# Altium integrated library UG-2864HSWEG01.IntLib: 1 symbol
Pins are listed as number, name and electrical type; pins without a type are passive.

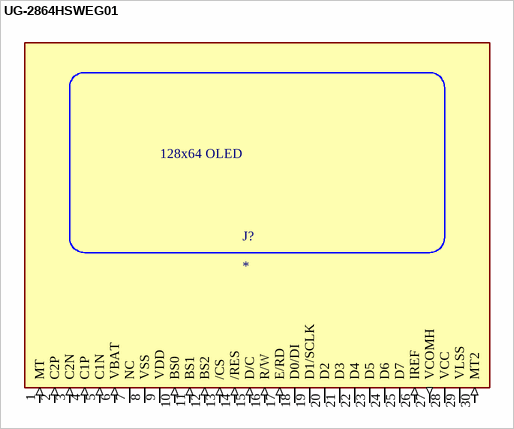
[diagram p0: symbol UG-2864HSWEG01]

## UG-2864HSWEG01
designator J?
0.96 128x64 White OLED; MF: WiseChip; MP: UG-2864HSWEG01; SnapEDA_Link: https://www.snapeda.com/parts/UG-2864HSWEG01/WiseChip/view-part/?ref=snap; Package: None; Value: *; Check_prices: https://www.snapeda.com/parts/UG-2864HSWEG01/WiseChip/view-part/?ref=eda
footprint 1X30-0.7MM
pins: 1 MT (in), 2 C2P (in), 3 C2N (in), 4 C1P (in), 5 C1N (in), 6 VBAT (in), 7 NC, 8 VSS (power), 9 VDD (power), 10 BS0 (in), 11 BS1 (in), 12 BS2 (in), 13 /CS (in), 14 /RES (in), 15 D/C (in), 16 R/W (in), 17 E/RD (in), 18 D0/DI (io), 19 D1/SCLK (io), 20 D2 (io), 21 D3 (io), 22 D4 (io), 23 D5 (io), 24 D6 (io), 25 D7 (io), 26 IREF (in), 27 VCOMH (out), 28 VCC (power), 29 VLSS (power), 30 MT2 (in)
text: 128x64 OLED